# Altium schematic symbol library ERA-6AEB103V.SchLib: 1 symbol
Pins are listed as number, name and electrical type; pins without a type are passive.

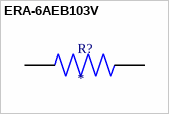
[diagram p0: symbol ERA-6AEB103V]

## ERA-6AEB103V
designator R?
Res Thin Film 0805 10K Ohm 0.1% 0.125W(1/8W) 25ppm/C Molded SMD Punched Carrier T/R; MF: Panasonic; MP: ERA-6AEB103V; SnapEDA_Link: https://www.snapeda.com/parts/ERA-6AEB103V/Panasonic+Electronic+Components/view-part/?ref=snap; Package: 2012-2 Panasonic; Value: *; Check_prices: https://www.snapeda.com/parts/ERA-6AEB103V/Panasonic+Electronic+Components/view-part/?ref=eda
footprint RESC2012X60N
pins: 1, 2